# Altium footprint library MicroProcessor$.PcbLib: 8 footprints (part 1 of 2)
Each footprint in its own frame and in the unit in brackets; x right, y up, seen from the top. Pads: shape width x height; smd on the part's side, far side on the other; paste and mask are expansions set on the pad; w line width, h text height; cw(c..) or ccw(c..) is an arc to the next point about the centre after c.
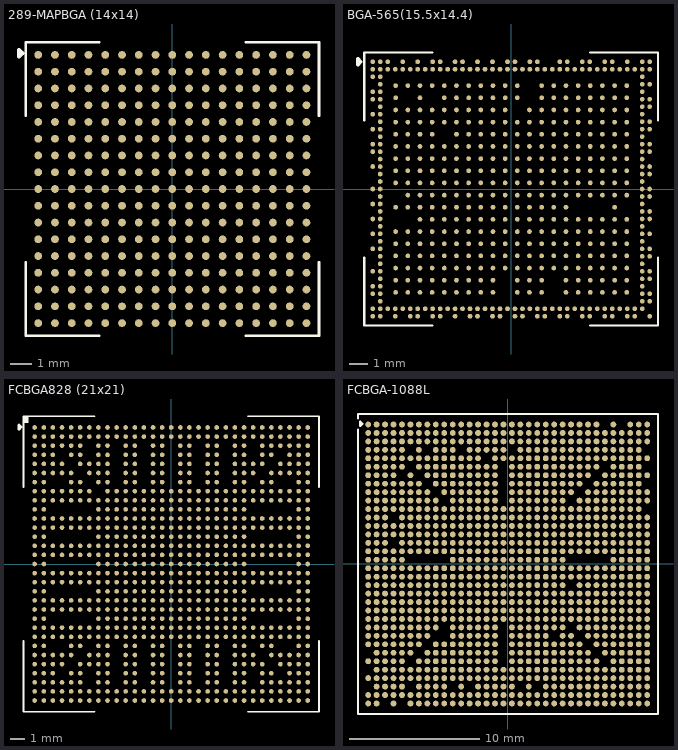
[diagram p0: the footprints below, top view; thin cyan lines are the x and y axes]

## 289-MAPBGA (14x14) [mm]
pads (289):
  round 0.37 smd: A1(-6.4,6.4) A2(-5.6,6.4) A3(-4.8,6.4) A4(-4,6.4) A5(-3.2,6.4) A6(-2.4,6.4) A7(-1.6,6.4) A8(-0.8,6.4) A9(0,6.4) A10(0.8,6.4) A11(1.6,6.4) A12(2.4,6.4) A13(3.2,6.4) A14(4,6.4) A15(4.8,6.4) A16(5.6,6.4) A17(6.4,6.4) B1(-6.4,5.6) B2(-5.6,5.6) B3(-4.8,5.6) B4(-4,5.6) B5(-3.2,5.6) B6(-2.4,5.6) B7(-1.6,5.6) B8(-0.8,5.6) B9(0,5.6) B10(0.8,5.6) B11(1.6,5.6) B12(2.4,5.6) B13(3.2,5.6) B14(4,5.6) B15(4.8,5.6) B16(5.6,5.6) B17(6.4,5.6) C1(-6.4,4.8) C2(-5.6,4.8) C3(-4.8,4.8) C4(-4,4.8) C5(-3.2,4.8) C6(-2.4,4.8) C7(-1.6,4.8) C8(-0.8,4.8) C9(0,4.8) C10(0.8,4.8) C11(1.6,4.8) C12(2.4,4.8) C13(3.2,4.8) C14(4,4.8) C15(4.8,4.8) C16(5.6,4.8) C17(6.4,4.8) D1(-6.4,4) D2(-5.6,4) D3(-4.8,4) D4(-4,4) D5(-3.2,4) D6(-2.4,4) D7(-1.6,4) D8(-0.8,4) D9(0,4) D10(0.8,4) D11(1.6,4) D12(2.4,4) D13(3.2,4) D14(4,4) D15(4.8,4) D16(5.6,4) D17(6.4,4) E1(-6.4,3.2) E2(-5.6,3.2) E3(-4.8,3.2) E4(-4,3.2) E5(-3.2,3.2) E6(-2.4,3.2) E7(-1.6,3.2) E8(-0.8,3.2) E9(0,3.2) E10(0.8,3.2) E11(1.6,3.2) E12(2.4,3.2) E13(3.2,3.2) E14(4,3.2) E15(4.8,3.2) E16(5.6,3.2) E17(6.4,3.2) F1(-6.4,2.4) F2(-5.6,2.4) F3(-4.8,2.4) F4(-4,2.4) F5(-3.2,2.4) F6(-2.4,2.4) F7(-1.6,2.4) F8(-0.8,2.4) F9(0,2.4) F10(0.8,2.4) F11(1.6,2.4) F12(2.4,2.4) F13(3.2,2.4) F14(4,2.4) F15(4.8,2.4) F16(5.6,2.4) F17(6.4,2.4) G1(-6.4,1.6) G2(-5.6,1.6) G3(-4.8,1.6) G4(-4,1.6) G5(-3.2,1.6) G6(-2.4,1.6) G7(-1.6,1.6) G8(-0.8,1.6) G9(0,1.6) G10(0.8,1.6) G11(1.6,1.6) G12(2.4,1.6) G13(3.2,1.6) G14(4,1.6) G15(4.8,1.6) G16(5.6,1.6) G17(6.4,1.6) H1(-6.4,0.8) H2(-5.6,0.8) H3(-4.8,0.8) H4(-4,0.8) H5(-3.2,0.8) H6(-2.4,0.8) H7(-1.6,0.8) H8(-0.8,0.8) H9(0,0.8) H10(0.8,0.8) H11(1.6,0.8) H12(2.4,0.8) H13(3.2,0.8) H14(4,0.8) H15(4.8,0.8) H16(5.6,0.8) H17(6.4,0.8) J1(-6.4,0) J2(-5.6,0) J3(-4.8,0) J4(-4,0) J5(-3.2,0) J6(-2.4,0) J7(-1.6,0) J8(-0.8,0) J9(0,0) J10(0.8,0) J11(1.6,0) J12(2.4,0) J13(3.2,0) J14(4,0) J15(4.8,0) J16(5.6,0) J17(6.4,0) K1(-6.4,-0.8) K2(-5.6,-0.8) K3(-4.8,-0.8) K4(-4,-0.8) K5(-3.2,-0.8) K6(-2.4,-0.8) K7(-1.6,-0.8) K8(-0.8,-0.8) K9(0,-0.8) K10(0.8,-0.8) K11(1.6,-0.8) K12(2.4,-0.8) K13(3.2,-0.8) K14(4,-0.8) K15(4.8,-0.8) K16(5.6,-0.8) K17(6.4,-0.8) L1(-6.4,-1.6) L2(-5.6,-1.6) L3(-4.8,-1.6) L4(-4,-1.6) L5(-3.2,-1.6) L6(-2.4,-1.6) L7(-1.6,-1.6) L8(-0.8,-1.6) L9(0,-1.6) L10(0.8,-1.6) L11(1.6,-1.6) L12(2.4,-1.6) L13(3.2,-1.6) L14(4,-1.6) L15(4.8,-1.6) L16(5.6,-1.6) L17(6.4,-1.6) M1(-6.4,-2.4) M2(-5.6,-2.4) M3(-4.8,-2.4) M4(-4,-2.4) M5(-3.2,-2.4) M6(-2.4,-2.4) M7(-1.6,-2.4) M8(-0.8,-2.4) M9(0,-2.4) M10(0.8,-2.4) M11(1.6,-2.4) M12(2.4,-2.4) M13(3.2,-2.4) M14(4,-2.4) M15(4.8,-2.4) M16(5.6,-2.4) M17(6.4,-2.4) N1(-6.4,-3.2) N2(-5.6,-3.2) N3(-4.8,-3.2) N4(-4,-3.2) N5(-3.2,-3.2) N6(-2.4,-3.2) N7(-1.6,-3.2) N8(-0.8,-3.2) N9(0,-3.2) N10(0.8,-3.2) N11(1.6,-3.2) N12(2.4,-3.2) N13(3.2,-3.2) N14(4,-3.2) N15(4.8,-3.2) N16(5.6,-3.2) N17(6.4,-3.2) P1(-6.4,-4) P2(-5.6,-4) P3(-4.8,-4) P4(-4,-4) P5(-3.2,-4) P6(-2.4,-4) P7(-1.6,-4) P8(-0.8,-4) P9(0,-4) P10(0.8,-4) P11(1.6,-4) P12(2.4,-4) P13(3.2,-4) P14(4,-4) P15(4.8,-4) P16(5.6,-4) P17(6.4,-4) R1(-6.4,-4.8) R2(-5.6,-4.8) R3(-4.8,-4.8) R4(-4,-4.8) R5(-3.2,-4.8) R6(-2.4,-4.8) R7(-1.6,-4.8) R8(-0.8,-4.8) R9(0,-4.8) R10(0.8,-4.8) R11(1.6,-4.8) R12(2.4,-4.8) R13(3.2,-4.8) R14(4,-4.8) R15(4.8,-4.8) R16(5.6,-4.8) R17(6.4,-4.8) T1(-6.4,-5.6) T2(-5.6,-5.6) T3(-4.8,-5.6) T4(-4,-5.6) T5(-3.2,-5.6) T6(-2.4,-5.6) T7(-1.6,-5.6) T8(-0.8,-5.6) T9(0,-5.6) T10(0.8,-5.6) T11(1.6,-5.6) T12(2.4,-5.6) T13(3.2,-5.6) T14(4,-5.6) T15(4.8,-5.6) T16(5.6,-5.6) T17(6.4,-5.6) U1(-6.4,-6.4) U2(-5.6,-6.4) U3(-4.8,-6.4) U4(-4,-6.4) U5(-3.2,-6.4) U6(-2.4,-6.4) U7(-1.6,-6.4) U8(-0.8,-6.4) U9(0,-6.4) U10(0.8,-6.4) U11(1.6,-6.4) U12(2.4,-6.4) U13(3.2,-6.4) U14(4,-6.4) U15(4.8,-6.4) U16(5.6,-6.4) U17(6.4,-6.4)
Top Overlay:
  lines w0.127: -7,-3.5 -7,-7 -3.5,-7 ; -7,3.5 -7,7 -3.5,7 ; 3.5,-7 7,-7 7,-3.5 ; 3.5,7 7,7 7,3.5
  lines w0.2: -7.315,6.325 -7.163,6.477 -7.315,6.629 -7.315,6.325
3D body "step_temp.STEP": height 1.32, standoff 0, extent -7,-7 7,7

## BGA-565(15.5x14.4) [mm]
pads (565):
  round 0.25 smd mask+0.05: 1A1(-6.175,5.525) 1A2(-5.525,5.525) 1A3(-4.875,5.525) 1A4(-4.225,5.525) 1A5(-3.575,5.525) 1A6(-2.925,5.525) 1A7(-2.275,5.525) 1A8(-1.625,5.525) 1A9(-0.975,5.525) 1A10(-0.325,5.525) 1A11(0.325,5.525) 1A13(1.625,5.525) 1A14(2.275,5.525) 1A15(2.925,5.525) 1A16(3.575,5.525) 1A17(4.225,5.525) 1A18(4.875,5.525) 1A19(5.525,5.525) 1A20(6.175,5.525) 1B1(-6.175,4.875) 1B3(-4.875,4.875) 1B5(-3.575,4.875) 1B6(-2.925,4.875) 1B7(-2.275,4.875) 1B8(-1.625,4.875) 1B9(-0.975,4.875) 1B10(-0.325,4.875) 1B11(0.325,4.875) 1B13(1.625,4.875) 1B14(2.275,4.875) 1B15(2.925,4.875) 1B16(3.575,4.875) 1B17(4.225,4.875) 1B18(4.875,4.875) 1B19(5.525,4.875) 1B20(6.175,4.875) 1C1(-6.175,4.225) 1C2(-5.525,4.225) 1C3(-4.875,4.225) 1C4(-4.225,4.225) 1C5(-3.575,4.225) 1C6(-2.925,4.225) 1C7(-2.275,4.225) 1C8(-1.625,4.225) 1C9(-0.975,4.225) 1C10(-0.325,4.225) 1C12(0.975,4.225) 1C13(1.625,4.225) 1C14(2.275,4.225) 1C15(2.925,4.225) 1C16(3.575,4.225) 1C17(4.225,4.225) 1C18(4.875,4.225) 1C19(5.525,4.225) 1C20(6.175,4.225) 1D1(-6.175,3.575) 1D2(-5.525,3.575) 1D3(-4.875,3.575) 1D4(-4.225,3.575) 1D5(-3.575,3.575) 1D6(-2.925,3.575) 1D7(-2.275,3.575) 1D8(-1.625,3.575) 1D9(-0.975,3.575) 1D10(-0.325,3.575) 1D11(0.325,3.575) 1D12(0.975,3.575) 1D13(1.625,3.575) 1D14(2.275,3.575) 1D15(2.925,3.575) 1D16(3.575,3.575) 1D17(4.225,3.575) 1D18(4.875,3.575) 1D19(5.525,3.575) 1D20(6.175,3.575) 1E1(-6.175,2.925) 1E2(-5.525,2.925) 1E3(-4.875,2.925) 1E4(-4.225,2.925) 1E6(-2.925,2.925) 1E7(-2.275,2.925) 1E8(-1.625,2.925) 1E9(-0.975,2.925) 1E10(-0.325,2.925) 1E11(0.325,2.925) 1E12(0.975,2.925) 1E13(1.625,2.925) 1E14(2.275,2.925) 1E15(2.925,2.925) 1E16(3.575,2.925) 1E17(4.225,2.925) 1E18(4.875,2.925) 1E19(5.525,2.925) 1E20(6.175,2.925) 1F1(-6.175,2.275) 1F2(-5.525,2.275) 1F3(-4.875,2.275) 1F4(-4.225,2.275) 1F5(-3.575,2.275) 1F6(-2.925,2.275) 1F7(-2.275,2.275) 1F8(-1.625,2.275) 1F9(-0.975,2.275) 1F10(-0.325,2.275) 1F11(0.325,2.275) 1F12(0.975,2.275) 1F13(1.625,2.275) 1F14(2.275,2.275) 1F15(2.925,2.275) 1F16(3.575,2.275) 1F17(4.225,2.275) 1F18(4.875,2.275) 1F19(5.525,2.275) 1F20(6.175,2.275) 1G1(-6.175,1.625) 1G2(-5.525,1.625) 1G3(-4.875,1.625) 1G4(-4.225,1.625) 1G5(-3.575,1.625) 1G6(-2.925,1.625) 1G7(-2.275,1.625) 1G8(-1.625,1.625) 1G9(-0.975,1.625) 1G10(-0.325,1.625) 1G11(0.325,1.625) 1G12(0.975,1.625) 1G13(1.625,1.625) 1G14(2.275,1.625) 1G15(2.925,1.625) 1G16(3.575,1.625) 1G17(4.225,1.625) 1G18(4.875,1.625) 1G19(5.525,1.625) 1G20(6.175,1.625) 1H1(-6.175,0.975) 1H2(-5.525,0.975) 1H3(-4.875,0.975) 1H4(-4.225,0.975) 1H5(-3.575,0.975) 1H6(-2.925,0.975) 1H7(-2.275,0.975) 1H8(-1.625,0.975) 1H9(-0.975,0.975) 1H10(-0.325,0.975) 1H11(0.325,0.975) 1H12(0.975,0.975) 1H13(1.625,0.975) 1H14(2.275,0.975) 1H15(2.925,0.975) 1H16(3.575,0.975) 1H17(4.225,0.975) 1H18(4.875,0.975) 1H19(5.525,0.975) 1H20(6.175,0.975) 1J1(-6.175,0.325) 1J2(-5.525,0.325) 1J3(-4.875,0.325) 1J4(-4.225,0.325) 1J5(-3.575,0.325) 1J6(-2.925,0.325) 1J7(-2.275,0.325) 1J8(-1.625,0.325) 1J9(-0.975,0.325) 1J10(-0.325,0.325) 1J11(0.325,0.325) 1J12(0.975,0.325) 1J13(1.625,0.325) 1J14(2.275,0.325) 1J15(2.925,0.325) 1J16(3.575,0.325) 1J17(4.225,0.325) 1J18(4.875,0.325) 1J19(5.525,0.325) 1J20(6.175,0.325) 1K2(-5.525,-0.325) 1K3(-4.875,-0.325) 1K4(-4.225,-0.325) 1K5(-3.575,-0.325) 1K6(-2.925,-0.325) 1K7(-2.275,-0.325) 1K8(-1.625,-0.325) 1K9(-0.975,-0.325) 1K10(-0.325,-0.325) 1K11(0.325,-0.325) 1K12(0.975,-0.325) 1K13(1.625,-0.325) 1K14(2.275,-0.325) 1K15(2.925,-0.325) 1K16(3.575,-0.325) 1K17(4.225,-0.325) 1K18(4.875,-0.325) 1K19(5.525,-0.325) 1K20(6.175,-0.325) 1L1(-6.175,-0.975) 1L2(-5.525,-0.975) 1L3(-4.875,-0.975) 1L4(-4.225,-0.975) 1L5(-3.575,-0.975) 1L6(-2.925,-0.975) 1L7(-2.275,-0.975) 1L8(-1.625,-0.975) 1L9(-0.975,-0.975) 1L10(-0.325,-0.975) 1L11(0.325,-0.975) 1L12(0.975,-0.975) 1L13(1.625,-0.975) 1L14(2.275,-0.975) 1L15(2.925,-0.975) 1L19(5.525,-0.975) 1M3(-4.875,-1.625) 1M4(-4.225,-1.625) 1M5(-3.575,-1.625) 1M6(-2.925,-1.625) 1M7(-2.275,-1.625) 1M8(-1.625,-1.625) 1M9(-0.975,-1.625) 1M10(-0.325,-1.625) 1M11(0.325,-1.625) 1M12(0.975,-1.625) 1M13(1.625,-1.625) 1M14(2.275,-1.625) 1M15(2.925,-1.625) 1M16(3.575,-1.625) 1M17(4.225,-1.625) 1M18(4.875,-1.625) 1M19(5.525,-1.625) 1M20(6.175,-1.625) 1N1(-6.175,-2.275) 1N2(-5.525,-2.275) 1N3(-4.875,-2.275) 1N4(-4.225,-2.275) 1N5(-3.575,-2.275) 1N6(-2.925,-2.275) 1N7(-2.275,-2.275) 1N8(-1.625,-2.275) 1N9(-0.975,-2.275) 1N10(-0.325,-2.275) 1N11(0.325,-2.275) 1N12(0.975,-2.275) 1N13(1.625,-2.275) 1N14(2.275,-2.275) 1N15(2.925,-2.275) 1N16(3.575,-2.275) 1N17(4.225,-2.275) 1N18(4.875,-2.275) 1N19(5.525,-2.275) 1N20(6.175,-2.275) 1P1(-6.175,-2.925) 1P2(-5.525,-2.925) 1P3(-4.875,-2.925) 1P4(-4.225,-2.925) 1P5(-3.575,-2.925) 1P6(-2.925,-2.925) 1P7(-2.275,-2.925) 1P8(-1.625,-2.925) 1P9(-0.975,-2.925) 1P10(-0.325,-2.925) 1P11(0.325,-2.925) 1P12(0.975,-2.925) 1P13(1.625,-2.925) 1P14(2.275,-2.925) 1P15(2.925,-2.925) 1P16(3.575,-2.925) 1P17(4.225,-2.925) 1P18(4.875,-2.925) 1P19(5.525,-2.925) 1P20(6.175,-2.925) 1R1(-6.175,-3.575) 1R2(-5.525,-3.575) 1R3(-4.875,-3.575) 1R4(-4.225,-3.575) 1R5(-3.575,-3.575) 1R6(-2.925,-3.575) 1R7(-2.275,-3.575) 1R8(-1.625,-3.575) 1R9(-0.975,-3.575) 1R10(-0.325,-3.575) 1R11(0.325,-3.575) 1R12(0.975,-3.575) 1R13(1.625,-3.575) 1R14(2.275,-3.575) 1R15(2.925,-3.575) 1R16(3.575,-3.575) 1R17(4.225,-3.575) 1R18(4.875,-3.575) 1R19(5.525,-3.575) 1R20(6.175,-3.575) 1T1(-6.175,-4.225) 1T2(-5.525,-4.225) 1T3(-4.875,-4.225) 1T4(-4.225,-4.225) 1T5(-3.575,-4.225) 1T6(-2.925,-4.225) 1T7(-2.275,-4.225) 1T8(-1.625,-4.225) 1T9(-0.975,-4.225) 1T10(-0.325,-4.225) 1T11(0.325,-4.225) 1T12(0.975,-4.225) 1T13(1.625,-4.225) 1T14(2.275,-4.225) 1T15(2.925,-4.225) 1T16(3.575,-4.225) 1T17(4.225,-4.225) 1T18(4.875,-4.225) 1T19(5.525,-4.225) 1T20(6.175,-4.225) 1U1(-6.175,-4.875) 1U2(-5.525,-4.875) 1U3(-4.875,-4.875) 1U4(-4.225,-4.875) 1U5(-3.575,-4.875) 1U6(-2.925,-4.875) 1U7(-2.275,-4.875) 1U8(-1.625,-4.875) 1U9(-0.975,-4.875) 1U11(0.325,-4.875) 1U12(0.975,-4.875) 1U13(1.625,-4.875) 1U15(2.925,-4.875) 1U16(3.575,-4.875) 1U17(4.225,-4.875) 1U18(4.875,-4.875) 1U19(5.525,-4.875) 1U20(6.175,-4.875) 1V1(-6.175,-5.525) 1V2(-5.525,-5.525) 1V3(-4.875,-5.525) 1V4(-4.225,-5.525) 1V5(-3.575,-5.525) 1V6(-2.925,-5.525) 1V7(-2.275,-5.525) 1V8(-1.625,-5.525) 1V9(-0.975,-5.525) 1V11(0.325,-5.525) 1V12(0.975,-5.525) 1V13(1.625,-5.525) 1V15(2.925,-5.525) 1V16(3.575,-5.525) 1V17(4.225,-5.525) 1V18(4.875,-5.525) 1V19(5.525,-5.525) 1V20(6.175,-5.525) A1(-7.4,6.8) A2(-7,6.8) A3(-6.6,6.8) A5(-5.8,6.8) A7(-5,6.8) A9(-4.2,6.8) A10(-3.8,6.8) A12(-3,6.8) A13(-2.6,6.8) A15(-1.8,6.8) A17(-1,6.8) A19(-0.2,6.8) A20(0.2,6.8) A22(1,6.8) A23(1.4,6.8) A26(2.6,6.8) A27(3,6.8) A29(3.8,6.8) A30(4.2,6.8) A32(5,6.8) A33(5.4,6.8) A35(6.2,6.8) A37(7,6.8) A38(7.4,6.8) AA2(-7,-1.2) AA37(7,-1.2) AA38(7.4,-1.2) AB1(-7.4,-1.6) AB2(-7,-1.6) AB37(7,-1.6) AB38(7.4,-1.6) AC2(-7,-2) AC37(7,-2) AD1(-7.4,-2.4) AD2(-7,-2.4) AD37(7,-2.4) AD38(7.4,-2.4) AE2(-7,-2.8) AE37(7,-2.8) AF1(-7.4,-3.2) AF2(-7,-3.2) AF37(7,-3.2) AF38(7.4,-3.2) AG2(-7,-3.6) AG37(7,-3.6) AG38(7.4,-3.6) AH2(-7,-4) AH37(7,-4) AJ1(-7.4,-4.4) AJ2(-7,-4.4) AJ37(7,-4.4) AJ38(7.4,-4.4) AK2(-7,-4.8) AK37(7,-4.8) AK38(7.4,-4.8) AL1(-7.4,-5.2) AL2(-7,-5.2) AL37(7,-5.2) AM1(-7.4,-5.6) AM2(-7,-5.6) AM37(7,-5.6) AM38(7.4,-5.6) AN2(-7,-6) AN37(7,-6) AN38(7.4,-6) AP1(-7.4,-6.4) AP2(-7,-6.4) AP3(-6.6,-6.4) AP4(-6.2,-6.4) AP5(-5.8,-6.4) AP6(-5.4,-6.4) AP7(-5,-6.4) AP8(-4.6,-6.4) AP9(-4.2,-6.4) AP10(-3.8,-6.4) AP11(-3.4,-6.4) AP12(-3,-6.4) AP13(-2.6,-6.4) AP14(-2.2,-6.4) AP15(-1.8,-6.4) AP16(-1.4,-6.4) AP17(-1,-6.4) AP18(-0.6,-6.4) AP19(-0.2,-6.4) AP20(0.2,-6.4) AP21(0.6,-6.4) AP22(1,-6.4) AP23(1.4,-6.4) AP24(1.8,-6.4) AP25(2.2,-6.4) AP26(2.6,-6.4) AP27(3,-6.4) AP28(3.4,-6.4) AP29(3.8,-6.4) AP30(4.2,-6.4) AP31(4.6,-6.4) AP32(5,-6.4) AP33(5.4,-6.4) AP34(5.8,-6.4) AP35(6.2,-6.4) AP36(6.6,-6.4) AP37(7,-6.4) AR1(-7.4,-6.8) AR2(-7,-6.8) AR4(-6.2,-6.8) AR6(-5.4,-6.8) AR7(-5,-6.8) AR9(-4.2,-6.8) AR10(-3.8,-6.8) AR12(-3,-6.8) AR14(-2.2,-6.8) AR15(-1.8,-6.8) AR17(-1,-6.8) AR18(-0.6,-6.8) AR20(0.2,-6.8) AR21(0.6,-6.8) AR23(1.4,-6.8) AR24(1.8,-6.8) AR26(2.6,-6.8) AR27(3,-6.8) AR29(3.8,-6.8) AR30(4.2,-6.8) AR32(5,-6.8) AR33(5.4,-6.8) AR35(6.2,-6.8) AR36(6.6,-6.8) AR38(7.4,-6.8) B1(-7.4,6.4) B2(-7,6.4) B3(-6.6,6.4) B4(-6.2,6.4) B5(-5.8,6.4) B6(-5.4,6.4) B7(-5,6.4) B8(-4.6,6.4) B9(-4.2,6.4) B10(-3.8,6.4) B11(-3.4,6.4) B12(-3,6.4) B13(-2.6,6.4) B14(-2.2,6.4) B15(-1.8,6.4) B16(-1.4,6.4) B17(-1,6.4) B18(-0.6,6.4) B19(-0.2,6.4) B20(0.2,6.4) B21(0.6,6.4) B22(1,6.4) B23(1.4,6.4) B24(1.8,6.4) B25(2.2,6.4) B26(2.6,6.4) B27(3,6.4) B28(3.4,6.4) B29(3.8,6.4) B30(4.2,6.4) B31(4.6,6.4) B32(5,6.4) B33(5.4,6.4) B34(5.8,6.4) B35(6.2,6.4) B36(6.6,6.4) B37(7,6.4) B38(7.4,6.4) C1(-7.4,6) C2(-7,6) C37(7,6) D2(-7,5.6) D37(7,5.6) D38(7.4,5.6) E1(-7.4,5.2) E2(-7,5.2) E37(7,5.2) F1(-7.4,4.8) F2(-7,4.8) F37(7,4.8) F38(7.4,4.8) G2(-7,4.4) G37(7,4.4) G38(7.4,4.4) H1(-7.4,4) H2(-7,4) H37(7,4) J2(-7,3.6) J37(7,3.6) J38(7.4,3.6) K1(-7.4,3.2) K2(-7,3.2) K37(7,3.2) K38(7.4,3.2) L2(-7,2.8) L37(7,2.8) M1(-7.4,2.4) M2(-7,2.4) M37(7,2.4) M38(7.4,2.4) N1(-7.4,2) N2(-7,2) N37(7,2) N38(7.4,2) P2(-7,1.6) P37(7,1.6) R1(-7.4,1.2) R2(-7,1.2) R37(7,1.2) R38(7.4,1.2) T2(-7,0.8) T37(7,0.8) T38(7.4,0.8) U2(-7,0.4) U37(7,0.4) V1(-7.4,0) V2(-7,0) V37(7,0) V38(7.4,0) W2(-7,-0.4) W37(7,-0.4) W38(7.4,-0.4) Y1(-7.4,-0.8) Y2(-7,-0.8) Y37(7,-0.8)
Top Overlay:
  lines w0.127: -7.845,-3.671 -7.845,-7.296 -4.22,-7.296 ; -7.845,3.671 -7.845,7.296 -4.22,7.296 ; 4.22,-7.296 7.845,-7.296 7.845,-3.671 ; 4.22,7.296 7.845,7.296 7.845,3.671
  lines w0.2: -8.187,6.648 -8.035,6.8 -8.187,6.952 -8.187,6.648
3D body "RK3566--3DModel-STEP-56544.STEP": height 0.9, standoff 0, extent -7.75,-7.2 7.75,7.2

## FCBGA828 (21x21) [mm]
pads (828):
  round 0.33 smd: A1(-9.75,9.75) A2(-9.1,9.75) A3(-8.45,9.75) A4(-7.8,9.75) A5(-7.15,9.75) A6(-6.5,9.75) A7(-5.85,9.75) A8(-5.2,9.75) A9(-4.55,9.75) A10(-3.9,9.75) A11(-3.25,9.75) A12(-2.6,9.75) A13(-1.95,9.75) A14(-1.3,9.75) A15(-0.65,9.75) A16(0,9.75) A17(0.65,9.75) A18(1.3,9.75) A19(1.95,9.75) A20(2.6,9.75) A21(3.25,9.75) A22(3.9,9.75) A23(4.55,9.75) A24(5.2,9.75) A25(5.85,9.75) A26(6.5,9.75) A27(7.15,9.75) A28(7.8,9.75) A29(8.45,9.75) A30(9.1,9.75) A31(9.75,9.75) AA1(-9.75,-3.25) AA2(-9.1,-3.25) AA3(-8.45,-3.25) AA4(-7.8,-3.25) AA5(-7.15,-3.25) AA6(-6.5,-3.25) AA7(-5.85,-3.25) AA8(-5.2,-3.25) AA9(-4.55,-3.25) AA10(-3.9,-3.25) AA11(-3.25,-3.25) AA12(-2.6,-3.25) AA13(-1.95,-3.25) AA14(-1.3,-3.25) AA15(-0.65,-3.25) AA16(0,-3.25) AA17(0.65,-3.25) AA18(1.3,-3.25) AA19(1.95,-3.25) AA20(2.6,-3.25) AA21(3.25,-3.25) AA22(3.9,-3.25) AA23(4.55,-3.25) AA24(5.2,-3.25) AA25(5.85,-3.25) AA26(6.5,-3.25) AA27(7.15,-3.25) AA28(7.8,-3.25) AA29(8.45,-3.25) AA30(9.1,-3.25) AA31(9.75,-3.25) AB1(-9.75,-3.9) AB2(-9.1,-3.9) AB8(-5.2,-3.9) AB9(-4.55,-3.9) AB10(-3.9,-3.9) AB11(-3.25,-3.9) AB12(-2.6,-3.9) AB13(-1.95,-3.9) AB14(-1.3,-3.9) AB15(-0.65,-3.9) AB16(0,-3.9) AB17(0.65,-3.9) AB18(1.3,-3.9) AB19(1.95,-3.9) AB20(2.6,-3.9) AB21(3.25,-3.9) AB22(3.9,-3.9) AB23(4.55,-3.9) AB24(5.2,-3.9) AB30(9.1,-3.9) AB31(9.75,-3.9) AC1(-9.75,-4.55) AC2(-9.1,-4.55) AC3(-8.45,-4.55) AC4(-7.8,-4.55) AC5(-7.15,-4.55) AC6(-6.5,-4.55) AC7(-5.85,-4.55) AC8(-5.2,-4.55) AC9(-4.55,-4.55) AC10(-3.9,-4.55) AC11(-3.25,-4.55) AC12(-2.6,-4.55) AC13(-1.95,-4.55) AC14(-1.3,-4.55) AC15(-0.65,-4.55) AC16(0,-4.55) AC17(0.65,-4.55) AC18(1.3,-4.55) AC19(1.95,-4.55) AC20(2.6,-4.55) AC21(3.25,-4.55) AC22(3.9,-4.55) AC23(4.55,-4.55) AC24(5.2,-4.55) AC25(5.85,-4.55) AC26(6.5,-4.55) AC27(7.15,-4.55) AC28(7.8,-4.55) AC29(8.45,-4.55) AC30(9.1,-4.55) AC31(9.75,-4.55) AD1(-9.75,-5.2) AD2(-9.1,-5.2) AD3(-8.45,-5.2) AD4(-7.8,-5.2) AD5(-7.15,-5.2) AD6(-6.5,-5.2) AD7(-5.85,-5.2) AD8(-5.2,-5.2) AD9(-4.55,-5.2) AD10(-3.9,-5.2) AD11(-3.25,-5.2) AD12(-2.6,-5.2) AD13(-1.95,-5.2) AD14(-1.3,-5.2) AD15(-0.65,-5.2) AD16(0,-5.2) AD17(0.65,-5.2) AD18(1.3,-5.2) AD19(1.95,-5.2) AD20(2.6,-5.2) AD21(3.25,-5.2) AD22(3.9,-5.2) AD23(4.55,-5.2) AD24(5.2,-5.2) AD25(5.85,-5.2) AD26(6.5,-5.2) AD27(7.15,-5.2) AD28(7.8,-5.2) AD29(8.45,-5.2) AD30(9.1,-5.2) AD31(9.75,-5.2) AE1(-9.75,-5.85) AE2(-9.1,-5.85) AE5(-7.15,-5.85) AE6(-6.5,-5.85) AE8(-5.2,-5.85) AE9(-4.55,-5.85) AE11(-3.25,-5.85) AE12(-2.6,-5.85) AE14(-1.3,-5.85) AE15(-0.65,-5.85) AE17(0.65,-5.85) AE18(1.3,-5.85) AE20(2.6,-5.85) AE21(3.25,-5.85) AE23(4.55,-5.85) AE24(5.2,-5.85) AE26(6.5,-5.85) AE27(7.15,-5.85) AE30(9.1,-5.85) AE31(9.75,-5.85) AF1(-9.75,-6.5) AF2(-9.1,-6.5) AF3(-8.45,-6.5) AF4(-7.8,-6.5) AF5(-7.15,-6.5) AF7(-5.85,-6.5) AF8(-5.2,-6.5) AF9(-4.55,-6.5) AF11(-3.25,-6.5) AF12(-2.6,-6.5) AF14(-1.3,-6.5) AF15(-0.65,-6.5) AF17(0.65,-6.5) AF18(1.3,-6.5) AF20(2.6,-6.5) AF21(3.25,-6.5) AF23(4.55,-6.5) AF24(5.2,-6.5) AF25(5.85,-6.5) AF27(7.15,-6.5) AF28(7.8,-6.5) AF29(8.45,-6.5) AF30(9.1,-6.5) AF31(9.75,-6.5) AG1(-9.75,-7.15) AG2(-9.1,-7.15) AG3(-8.45,-7.15) AG4(-7.8,-7.15) AG6(-6.5,-7.15) AG7(-5.85,-7.15) AG8(-5.2,-7.15) AG9(-4.55,-7.15) AG11(-3.25,-7.15) AG12(-2.6,-7.15) AG14(-1.3,-7.15) AG15(-0.65,-7.15) AG17(0.65,-7.15) AG18(1.3,-7.15) AG20(2.6,-7.15) AG21(3.25,-7.15) AG23(4.55,-7.15) AG24(5.2,-7.15) AG25(5.85,-7.15) AG26(6.5,-7.15) AG28(7.8,-7.15) AG29(8.45,-7.15) AG30(9.1,-7.15) AG31(9.75,-7.15) AH1(-9.75,-7.8) AH2(-9.1,-7.8) AH3(-8.45,-7.8) AH5(-7.15,-7.8) AH6(-6.5,-7.8) AH8(-5.2,-7.8) AH9(-4.55,-7.8) AH11(-3.25,-7.8) AH12(-2.6,-7.8) AH14(-1.3,-7.8) AH15(-0.65,-7.8) AH17(0.65,-7.8) AH18(1.3,-7.8) AH20(2.6,-7.8) AH21(3.25,-7.8) AH23(4.55,-7.8) AH24(5.2,-7.8) AH26(6.5,-7.8) AH27(7.15,-7.8) AH29(8.45,-7.8) AH30(9.1,-7.8) AH31(9.75,-7.8) AJ1(-9.75,-8.45) AJ2(-9.1,-8.45) AJ3(-8.45,-8.45) AJ4(-7.8,-8.45) AJ5(-7.15,-8.45) AJ6(-6.5,-8.45) AJ8(-5.2,-8.45) AJ9(-4.55,-8.45) AJ11(-3.25,-8.45) AJ12(-2.6,-8.45) AJ14(-1.3,-8.45) AJ15(-0.65,-8.45) AJ17(0.65,-8.45) AJ18(1.3,-8.45) AJ20(2.6,-8.45) AJ21(3.25,-8.45) AJ23(4.55,-8.45) AJ24(5.2,-8.45) AJ26(6.5,-8.45) AJ27(7.15,-8.45) AJ28(7.8,-8.45) AJ29(8.45,-8.45) AJ30(9.1,-8.45) AJ31(9.75,-8.45) AK1(-9.75,-9.1) AK2(-9.1,-9.1) AK3(-8.45,-9.1) AK4(-7.8,-9.1) AK5(-7.15,-9.1) AK6(-6.5,-9.1) AK7(-5.85,-9.1) AK8(-5.2,-9.1) AK9(-4.55,-9.1) AK10(-3.9,-9.1) AK11(-3.25,-9.1) AK12(-2.6,-9.1) AK13(-1.95,-9.1) AK14(-1.3,-9.1) AK15(-0.65,-9.1) AK16(0,-9.1) AK17(0.65,-9.1) AK18(1.3,-9.1) AK19(1.95,-9.1) AK20(2.6,-9.1) AK21(3.25,-9.1) AK22(3.9,-9.1) AK23(4.55,-9.1) AK24(5.2,-9.1) AK25(5.85,-9.1) AK26(6.5,-9.1) AK27(7.15,-9.1) AK28(7.8,-9.1) AK29(8.45,-9.1) AK30(9.1,-9.1) AK31(9.75,-9.1) AL1(-9.75,-9.75) AL2(-9.1,-9.75) AL3(-8.45,-9.75) AL4(-7.8,-9.75) AL5(-7.15,-9.75) AL6(-6.5,-9.75) AL7(-5.85,-9.75) AL8(-5.2,-9.75) AL9(-4.55,-9.75) AL10(-3.9,-9.75) AL11(-3.25,-9.75) AL12(-2.6,-9.75) AL13(-1.95,-9.75) AL14(-1.3,-9.75) AL15(-0.65,-9.75) AL16(0,-9.75) AL17(0.65,-9.75) AL18(1.3,-9.75) AL19(1.95,-9.75) AL20(2.6,-9.75) AL21(3.25,-9.75) AL22(3.9,-9.75) AL23(4.55,-9.75) AL24(5.2,-9.75) AL25(5.85,-9.75) AL26(6.5,-9.75) AL27(7.15,-9.75) AL28(7.8,-9.75) AL29(8.45,-9.75) AL30(9.1,-9.75) AL31(9.75,-9.75) B1(-9.75,9.1) B2(-9.1,9.1) B3(-8.45,9.1) B4(-7.8,9.1) B5(-7.15,9.1) B6(-6.5,9.1) B7(-5.85,9.1) B8(-5.2,9.1) B9(-4.55,9.1) B10(-3.9,9.1) B11(-3.25,9.1) B12(-2.6,9.1) B13(-1.95,9.1) B14(-1.3,9.1) B15(-0.65,9.1) B16(0,9.1) B17(0.65,9.1) B18(1.3,9.1) B19(1.95,9.1) B20(2.6,9.1) B21(3.25,9.1) B22(3.9,9.1) B23(4.55,9.1) B24(5.2,9.1) B25(5.85,9.1) B26(6.5,9.1) B27(7.15,9.1) B28(7.8,9.1) B29(8.45,9.1) B30(9.1,9.1) B31(9.75,9.1) C1(-9.75,8.45) C2(-9.1,8.45) C3(-8.45,8.45) C4(-7.8,8.45) C5(-7.15,8.45) C6(-6.5,8.45) C8(-5.2,8.45) C9(-4.55,8.45) C11(-3.25,8.45) C12(-2.6,8.45) C14(-1.3,8.45) C15(-0.65,8.45) C17(0.65,8.45) C18(1.3,8.45) C20(2.6,8.45) C21(3.25,8.45) C23(4.55,8.45) C24(5.2,8.45) C26(6.5,8.45) C27(7.15,8.45) C28(7.8,8.45) C29(8.45,8.45) C30(9.1,8.45) C31(9.75,8.45) D1(-9.75,7.8) D2(-9.1,7.8) D3(-8.45,7.8) D5(-7.15,7.8) D6(-6.5,7.8) D8(-5.2,7.8) D9(-4.55,7.8) D11(-3.25,7.8) D12(-2.6,7.8) D14(-1.3,7.8) D15(-0.65,7.8) D17(0.65,7.8) D18(1.3,7.8) D20(2.6,7.8) D21(3.25,7.8) D23(4.55,7.8) D24(5.2,7.8) D26(6.5,7.8) D27(7.15,7.8) D29(8.45,7.8) D30(9.1,7.8) D31(9.75,7.8) E1(-9.75,7.15) E2(-9.1,7.15) E3(-8.45,7.15) E4(-7.8,7.15) E6(-6.5,7.15) E7(-5.85,7.15) E8(-5.2,7.15) E9(-4.55,7.15) E11(-3.25,7.15) E12(-2.6,7.15) E14(-1.3,7.15) E15(-0.65,7.15) E17(0.65,7.15) E18(1.3,7.15) E20(2.6,7.15) E21(3.25,7.15) E23(4.55,7.15) E24(5.2,7.15) E25(5.85,7.15) E26(6.5,7.15) E28(7.8,7.15) E29(8.45,7.15) E30(9.1,7.15) E31(9.75,7.15) F1(-9.75,6.5) F2(-9.1,6.5) F3(-8.45,6.5) F4(-7.8,6.5) F5(-7.15,6.5) F7(-5.85,6.5) F8(-5.2,6.5) F9(-4.55,6.5) F11(-3.25,6.5) F12(-2.6,6.5) F14(-1.3,6.5) F15(-0.65,6.5) F17(0.65,6.5) F18(1.3,6.5) F20(2.6,6.5) F21(3.25,6.5) F23(4.55,6.5) F24(5.2,6.5) F25(5.85,6.5) F27(7.15,6.5) F28(7.8,6.5) F29(8.45,6.5) F30(9.1,6.5) F31(9.75,6.5) G1(-9.75,5.85) G2(-9.1,5.85) G5(-7.15,5.85) G6(-6.5,5.85) G8(-5.2,5.85) G9(-4.55,5.85) G11(-3.25,5.85) G12(-2.6,5.85) G14(-1.3,5.85) G15(-0.65,5.85) G17(0.65,5.85) G18(1.3,5.85) G20(2.6,5.85) G21(3.25,5.85) G23(4.55,5.85) G24(5.2,5.85) G26(6.5,5.85) G27(7.15,5.85) G30(9.1,5.85) G31(9.75,5.85) H1(-9.75,5.2) H2(-9.1,5.2) H3(-8.45,5.2) H4(-7.8,5.2) H5(-7.15,5.2) H6(-6.5,5.2) H7(-5.85,5.2) H9(-4.55,5.2) H10(-3.9,5.2) H11(-3.25,5.2) H12(-2.6,5.2) H13(-1.95,5.2) H14(-1.3,5.2) H15(-0.65,5.2) H16(0,5.2) H17(0.65,5.2) H18(1.3,5.2) H19(1.95,5.2) H20(2.6,5.2) H21(3.25,5.2) H22(3.9,5.2) H23(4.55,5.2) H24(5.2,5.2) H25(5.85,5.2) H26(6.5,5.2) H27(7.15,5.2) H28(7.8,5.2) H29(8.45,5.2) H30(9.1,5.2) H31(9.75,5.2) J1(-9.75,4.55) J2(-9.1,4.55) J3(-8.45,4.55) J4(-7.8,4.55) J5(-7.15,4.55) J6(-6.5,4.55) J7(-5.85,4.55) J8(-5.2,4.55) J9(-4.55,4.55) J10(-3.9,4.55) J11(-3.25,4.55) J12(-2.6,4.55) J13(-1.95,4.55) J14(-1.3,4.55) J15(-0.65,4.55) J16(0,4.55) J17(0.65,4.55) J18(1.3,4.55) J19(1.95,4.55) J20(2.6,4.55) J21(3.25,4.55) J22(3.9,4.55) J23(4.55,4.55) J24(5.2,4.55) J25(5.85,4.55) J26(6.5,4.55) J27(7.15,4.55) J28(7.8,4.55) J29(8.45,4.55) J30(9.1,4.55) J31(9.75,4.55) K1(-9.75,3.9) K2(-9.1,3.9) K8(-5.2,3.9) K9(-4.55,3.9) K10(-3.9,3.9) K11(-3.25,3.9) K12(-2.6,3.9) K13(-1.95,3.9) K14(-1.3,3.9) K15(-0.65,3.9) K16(0,3.9) K17(0.65,3.9) K18(1.3,3.9) K19(1.95,3.9) K20(2.6,3.9) K21(3.25,3.9) K22(3.9,3.9) K23(4.55,3.9) K24(5.2,3.9) K30(9.1,3.9) K31(9.75,3.9) L1(-9.75,3.25) L2(-9.1,3.25) L3(-8.45,3.25) L4(-7.8,3.25) L5(-7.15,3.25) L6(-6.5,3.25) L7(-5.85,3.25) L8(-5.2,3.25) L9(-4.55,3.25) L10(-3.9,3.25) L11(-3.25,3.25) L12(-2.6,3.25) L13(-1.95,3.25) L14(-1.3,3.25) L15(-0.65,3.25) L16(0,3.25) L17(0.65,3.25) L18(1.3,3.25) L19(1.95,3.25) L20(2.6,3.25) L21(3.25,3.25) L22(3.9,3.25) L23(4.55,3.25) L24(5.2,3.25) L25(5.85,3.25) L26(6.5,3.25) L27(7.15,3.25) L28(7.8,3.25) L29(8.45,3.25) L30(9.1,3.25) L31(9.75,3.25) M1(-9.75,2.6) M2(-9.1,2.6) M3(-8.45,2.6) M4(-7.8,2.6) M5(-7.15,2.6) M6(-6.5,2.6) M7(-5.85,2.6) M8(-5.2,2.6) M9(-4.55,2.6) M10(-3.9,2.6) M11(-3.25,2.6) M12(-2.6,2.6) M13(-1.95,2.6) M14(-1.3,2.6) M15(-0.65,2.6) M16(0,2.6) M17(0.65,2.6) M18(1.3,2.6) M19(1.95,2.6) M20(2.6,2.6) M21(3.25,2.6) M22(3.9,2.6) M23(4.55,2.6) M24(5.2,2.6) M25(5.85,2.6) M26(6.5,2.6) M27(7.15,2.6) M28(7.8,2.6) M29(8.45,2.6) M30(9.1,2.6) M31(9.75,2.6) N1(-9.75,1.95) N2(-9.1,1.95) N8(-5.2,1.95) N9(-4.55,1.95) N10(-3.9,1.95) N11(-3.25,1.95) N12(-2.6,1.95) N13(-1.95,1.95) N14(-1.3,1.95) N15(-0.65,1.95) N16(0,1.95) N17(0.65,1.95) N18(1.3,1.95) N19(1.95,1.95) N20(2.6,1.95) N21(3.25,1.95) N22(3.9,1.95) N23(4.55,1.95) N24(5.2,1.95) N30(9.1,1.95) N31(9.75,1.95) P1(-9.75,1.3) P2(-9.1,1.3) P3(-8.45,1.3) P4(-7.8,1.3) P5(-7.15,1.3) P6(-6.5,1.3) P7(-5.85,1.3) P8(-5.2,1.3) P9(-4.55,1.3) P10(-3.9,1.3) P11(-3.25,1.3) P12(-2.6,1.3) P13(-1.95,1.3) P14(-1.3,1.3) P15(-0.65,1.3) P16(0,1.3) P17(0.65,1.3) P18(1.3,1.3) P19(1.95,1.3) P20(2.6,1.3) P21(3.25,1.3) P22(3.9,1.3) P23(4.55,1.3) P24(5.2,1.3) P25(5.85,1.3) P26(6.5,1.3) P27(7.15,1.3) P28(7.8,1.3) P29(8.45,1.3) P30(9.1,1.3) P31(9.75,1.3) R1(-9.75,0.65) R2(-9.1,0.65) R3(-8.45,0.65) R4(-7.8,0.65) R5(-7.15,0.65) R6(-6.5,0.65) R7(-5.85,0.65) R8(-5.2,0.65) R9(-4.55,0.65) R10(-3.9,0.65) R11(-3.25,0.65) R12(-2.6,0.65) R13(-1.95,0.65) R14(-1.3,0.65) R15(-0.65,0.65) R16(0,0.65) R17(0.65,0.65) R18(1.3,0.65) R19(1.95,0.65) R20(2.6,0.65) R21(3.25,0.65) R22(3.9,0.65) R23(4.55,0.65) R24(5.2,0.65) R25(5.85,0.65) R26(6.5,0.65) R27(7.15,0.65) R28(7.8,0.65) R29(8.45,0.65) R30(9.1,0.65) R31(9.75,0.65) T1(-9.75,0) T2(-9.1,0) T8(-5.2,0) T9(-4.55,0) T10(-3.9,0) T11(-3.25,0) T12(-2.6,0) T13(-1.95,0) T14(-1.3,0) T15(-0.65,0) T16(0,0) T17(0.65,0) T18(1.3,0) T19(1.95,0) T20(2.6,0) T21(3.25,0) T22(3.9,0) T23(4.55,0) T24(5.2,0) T30(9.1,0) T31(9.75,0) U1(-9.75,-0.65) U2(-9.1,-0.65) U3(-8.45,-0.65) U4(-7.8,-0.65) U5(-7.15,-0.65) U6(-6.5,-0.65) U7(-5.85,-0.65) U8(-5.2,-0.65) U9(-4.55,-0.65) U10(-3.9,-0.65) U11(-3.25,-0.65) U12(-2.6,-0.65) U13(-1.95,-0.65) U14(-1.3,-0.65) U15(-0.65,-0.65) U16(0,-0.65) U17(0.65,-0.65) U18(1.3,-0.65) U19(1.95,-0.65) U20(2.6,-0.65) U21(3.25,-0.65) U22(3.9,-0.65) U23(4.55,-0.65) U24(5.2,-0.65) U25(5.85,-0.65) U26(6.5,-0.65) U27(7.15,-0.65) U28(7.8,-0.65) U29(8.45,-0.65) U30(9.1,-0.65) U31(9.75,-0.65) V1(-9.75,-1.3) V2(-9.1,-1.3) V3(-8.45,-1.3) V4(-7.8,-1.3) V5(-7.15,-1.3) V6(-6.5,-1.3) V7(-5.85,-1.3) V8(-5.2,-1.3) V9(-4.55,-1.3) V10(-3.9,-1.3) V11(-3.25,-1.3) V12(-2.6,-1.3) V13(-1.95,-1.3) V14(-1.3,-1.3) V15(-0.65,-1.3) V16(0,-1.3) V17(0.65,-1.3) V18(1.3,-1.3) V19(1.95,-1.3) V20(2.6,-1.3) V21(3.25,-1.3) V22(3.9,-1.3) V23(4.55,-1.3) V24(5.2,-1.3) V25(5.85,-1.3) V26(6.5,-1.3) V27(7.15,-1.3) V28(7.8,-1.3) V29(8.45,-1.3) V30(9.1,-1.3) V31(9.75,-1.3) W1(-9.75,-1.95) W2(-9.1,-1.95) W8(-5.2,-1.95) W9(-4.55,-1.95) W10(-3.9,-1.95) W11(-3.25,-1.95) W12(-2.6,-1.95) W13(-1.95,-1.95) W14(-1.3,-1.95) W15(-0.65,-1.95) W16(0,-1.95) W17(0.65,-1.95) W18(1.3,-1.95) W19(1.95,-1.95) W20(2.6,-1.95) W21(3.25,-1.95) W22(3.9,-1.95) W23(4.55,-1.95) W24(5.2,-1.95) W30(9.1,-1.95) W31(9.75,-1.95) Y1(-9.75,-2.6) Y2(-9.1,-2.6) Y3(-8.45,-2.6) Y4(-7.8,-2.6) Y5(-7.15,-2.6) Y6(-6.5,-2.6) Y7(-5.85,-2.6) Y8(-5.2,-2.6) Y9(-4.55,-2.6) Y10(-3.9,-2.6) Y11(-3.25,-2.6) Y12(-2.6,-2.6) Y13(-1.95,-2.6) Y14(-1.3,-2.6) Y15(-0.65,-2.6) Y16(0,-2.6) Y17(0.65,-2.6) Y18(1.3,-2.6) Y19(1.95,-2.6) Y20(2.6,-2.6) Y21(3.25,-2.6) Y22(3.9,-2.6) Y23(4.55,-2.6) Y24(5.2,-2.6) Y25(5.85,-2.6) Y26(6.5,-2.6) Y27(7.15,-2.6) Y28(7.8,-2.6) Y29(8.45,-2.6) Y30(9.1,-2.6) Y31(9.75,-2.6)
Top Overlay:
  rectangle: -10.555,10.084 -10.185,10.555
  lines w0.127: -10.555,-5.475 -10.555,-10.555 -5.475,-10.555 ; -10.555,5.475 -10.555,10.555 -5.475,10.555 ; 5.475,-10.555 10.555,-10.555 10.555,-5.475 ; 5.475,10.555 10.555,10.555 10.555,5.475
  lines w0.2: -10.871,9.627 -10.871,9.931 -10.719,9.779 -10.871,9.627
3D body "RK3399--3DModel-STEP-56544.STEP": height 1.57, standoff -0.04, extent -10.5,-10.5 10.5,10.5

## FCBGA-1088L [mm]
pads (1089):
  round 0.45 smd: A1(-10.725,10.725) A2(-10.075,10.725) A3(-9.425,10.725) A4(-8.775,10.725) A5(-8.125,10.725) A6(-7.475,10.725) A7(-6.825,10.725) A8(-6.175,10.725) A9(-5.525,10.725) A10(-4.875,10.725) A11(-4.225,10.725) A12(-3.575,10.725) A13(-2.925,10.725) A14(-2.275,10.725) A15(-1.625,10.725) A16(-0.975,10.725) A17(-0.325,10.725) A18(0.325,10.725) A19(0.975,10.725) A20(1.625,10.725) A21(2.275,10.725) A22(2.925,10.725) A23(3.575,10.725) A24(4.225,10.725) A25(4.875,10.725) A26(5.525,10.725) A27(6.175,10.725) A28(6.825,10.725) A30(8.125,10.725) A32(9.425,10.725) A33(10.075,10.725) A34(10.725,10.725) AA1(-10.725,-2.275) AA2(-10.075,-2.275) AA3(-9.425,-2.275) AA4(-8.775,-2.275) AA5(-8.125,-2.275) AA6(-7.475,-2.275) AA7(-6.825,-2.275) AA8(-6.175,-2.275) AA9(-5.525,-2.275) AA10(-4.875,-2.275) AA11(-4.225,-2.275) AA12(-3.575,-2.275) AA13(-2.925,-2.275) AA14(-2.275,-2.275) AA15(-1.625,-2.275) AA16(-0.975,-2.275) AA17(-0.325,-2.275) AA18(0.325,-2.275) AA19(0.975,-2.275) AA20(1.625,-2.275) AA21(2.275,-2.275) AA22(2.925,-2.275) AA23(3.575,-2.275) AA24(4.225,-2.275) AA25(4.875,-2.275) AA26(5.525,-2.275) AA27(6.175,-2.275) AA28(6.825,-2.275) AA29(7.475,-2.275) AA30(8.125,-2.275) AA31(8.775,-2.275) AA32(9.425,-2.275) AA33(10.075,-2.275) AA34(10.725,-2.275) AB1(-10.725,-2.925) AB2(-10.075,-2.925) AB3(-9.425,-2.925) AB4(-8.775,-2.925) AB5(-8.125,-2.925) AB6(-7.475,-2.925) AB7(-6.825,-2.925) AB8(-6.175,-2.925) AB9(-5.525,-2.925) AB10(-4.875,-2.925) AB11(-4.225,-2.925) AB12(-3.575,-2.925) AB13(-2.925,-2.925) AB14(-2.275,-2.925) AB15(-1.625,-2.925) AB16(-0.975,-2.925) AB17(-0.325,-2.925) AB18(0.325,-2.925) AB19(0.975,-2.925) AB20(1.625,-2.925) AB21(2.275,-2.925) AB22(2.925,-2.925) AB23(3.575,-2.925) AB24(4.225,-2.925) AB25(4.875,-2.925) AB26(5.525,-2.925) AB27(6.175,-2.925) AB28(6.825,-2.925) AB29(7.475,-2.925) AB30(8.125,-2.925) AB31(8.775,-2.925) AB32(9.425,-2.925) AB33(10.075,-2.925) AB34(10.725,-2.925) AC1(-10.725,-3.575) AC2(-10.075,-3.575) AC3(-9.425,-3.575) AC4(-8.775,-3.575) AC5(-8.125,-3.575) AC6(-7.475,-3.575) AC7(-6.825,-3.575) AC8(-6.175,-3.575) AC9(-5.525,-3.575) AC10(-4.875,-3.575) AC11(-4.225,-3.575) AC12(-3.575,-3.575) AC13(-2.925,-3.575) AC14(-2.275,-3.575) AC15(-1.625,-3.575) AC16(-0.975,-3.575) AC17(-0.325,-3.575) AC18(0.325,-3.575) AC19(0.975,-3.575) AC20(1.625,-3.575) AC21(2.275,-3.575) AC22(2.925,-3.575) AC23(3.575,-3.575) AC24(4.225,-3.575) AC25(4.875,-3.575) AC26(5.525,-3.575) AC27(6.175,-3.575) AC28(6.825,-3.575) AC29(7.475,-3.575) AC30(8.125,-3.575) AC31(8.775,-3.575) AC32(9.425,-3.575) AC33(10.075,-3.575) AC34(10.725,-3.575) AD1(-10.725,-4.225) AD2(-10.075,-4.225) AD3(-9.425,-4.225) AD4(-8.775,-4.225) AD5(-8.125,-4.225) AD6(-7.475,-4.225) AD7(-6.825,-4.225) AD8(-6.175,-4.225) AD9(-5.525,-4.225) AD10(-4.875,-4.225) AD11(-4.225,-4.225) AD12(-3.575,-4.225) AD13(-2.925,-4.225) AD14(-2.275,-4.225) AD15(-1.625,-4.225) AD16(-0.975,-4.225) AD17(-0.325,-4.225) AD18(0.325,-4.225) AD19(0.975,-4.225) AD20(1.625,-4.225) AD21(2.275,-4.225) AD22(2.925,-4.225) AD23(3.575,-4.225) AD24(4.225,-4.225) AD25(4.875,-4.225) AD26(5.525,-4.225) AD27(6.175,-4.225) AD28(6.825,-4.225) AD29(7.475,-4.225) AD30(8.125,-4.225) AD31(8.775,-4.225) AD32(9.425,-4.225) AD33(10.075,-4.225) AD34(10.725,-4.225) AE1(-10.725,-4.875) AE2(-10.075,-4.875) AE3(-9.425,-4.875) AE4(-8.775,-4.875) AE5(-8.125,-4.875) AE6(-7.475,-4.875) AE7(-6.825,-4.875) AE8(-6.175,-4.875) AE9(-5.525,-4.875) AE11(-4.225,-4.875) AE12(-3.575,-4.875) AE13(-2.925,-4.875) AE14(-2.275,-4.875) AE15(-1.625,-4.875) AE16(-0.975,-4.875) AE18(0.325,-4.875) AE19(0.975,-4.875) AE20(1.625,-4.875) AE21(2.275,-4.875) AE22(2.925,-4.875) AE23(3.575,-4.875) AE24(4.225,-4.875) AE26(5.525,-4.875) AE27(6.175,-4.875) AE28(6.825,-4.875) AE29(7.475,-4.875) AE30(8.125,-4.875) AE31(8.775,-4.875) AE32(9.425,-4.875) AE33(10.075,-4.875) AE34(10.725,-4.875) AF1(-10.725,-5.525) AF2(-10.075,-5.525) AF3(-9.425,-5.525) AF4(-8.775,-5.525) AF5(-8.125,-5.525) AF6(-7.475,-5.525) AF7(-6.825,-5.525) AF8(-6.175,-5.525) AF11(-4.225,-5.525) AF12(-3.575,-5.525) AF13(-2.925,-5.525) AF14(-2.275,-5.525) AF15(-1.625,-5.525) AF16(-0.975,-5.525) AF18(0.325,-5.525) AF19(0.975,-5.525) AF20(1.625,-5.525) AF21(2.275,-5.525) AF22(2.925,-5.525) AF24(4.225,-5.525) AF25(4.875,-5.525) AF27(6.175,-5.525) AF28(6.825,-5.525) AF29(7.475,-5.525) AF30(8.125,-5.525) AF31(8.775,-5.525) AF32(9.425,-5.525) AF33(10.075,-5.525) AF34(10.725,-5.525) AG1(-10.725,-6.175) AG2(-10.075,-6.175) AG3(-9.425,-6.175) AG4(-8.775,-6.175) AG5(-8.125,-6.175) AG6(-7.475,-6.175) AG7(-6.825,-6.175) AG9(-5.525,-6.175) AG10(-4.875,-6.175) AG11(-4.225,-6.175) AG12(-3.575,-6.175) AG13(-2.925,-6.175) AG14(-2.275,-6.175) AG15(-1.625,-6.175) AG16(-0.975,-6.175) AG18(0.325,-6.175) AG19(0.975,-6.175) AG20(1.625,-6.175) AG21(2.275,-6.175) AG22(2.925,-6.175) AG23(3.575,-6.175) AG24(4.225,-6.175) AG25(4.875,-6.175) AG26(5.525,-6.175) AG28(6.825,-6.175) AG29(7.475,-6.175) AG30(8.125,-6.175) AG31(8.775,-6.175) AG32(9.425,-6.175) AG33(10.075,-6.175) AG34(10.725,-6.175) AH2(-10.075,-6.825) AH3(-9.425,-6.825) AH4(-8.775,-6.825) AH5(-8.125,-6.825) AH6(-7.475,-6.825) AH8(-6.175,-6.825) AH9(-5.525,-6.825) AH10(-4.875,-6.825) AH11(-4.225,-6.825) AH12(-3.575,-6.825) AH13(-2.925,-6.825) AH14(-2.275,-6.825) AH15(-1.625,-6.825) AH16(-0.975,-6.825) AH18(0.325,-6.825) AH19(0.975,-6.825) AH20(1.625,-6.825) AH21(2.275,-6.825) AH22(2.925,-6.825) AH23(3.575,-6.825) AH24(4.225,-6.825) AH25(4.875,-6.825) AH26(5.525,-6.825) AH27(6.175,-6.825) AH29(7.475,-6.825) AH30(8.125,-6.825) AH31(8.775,-6.825) AH32(9.425,-6.825) AH33(10.075,-6.825) AH34(10.725,-6.825) AJ1(-10.725,-7.475) AJ2(-10.075,-7.475) AJ3(-9.425,-7.475) AJ4(-8.775,-7.475) AJ5(-8.125,-7.475) AJ7(-6.825,-7.475) AJ8(-6.175,-7.475) AJ9(-5.525,-7.475) AJ10(-4.875,-7.475) AJ11(-4.225,-7.475) AJ12(-3.575,-7.475) AJ13(-2.925,-7.475) AJ14(-2.275,-7.475) AJ15(-1.625,-7.475) AJ16(-0.975,-7.475) AJ18(0.325,-7.475) AJ19(0.975,-7.475) AJ20(1.625,-7.475) AJ21(2.275,-7.475) AJ22(2.925,-7.475) AJ23(3.575,-7.475) AJ24(4.225,-7.475) AJ25(4.875,-7.475) AJ26(5.525,-7.475) AJ27(6.175,-7.475) AJ28(6.825,-7.475) AJ30(8.125,-7.475) AJ31(8.775,-7.475) AJ32(9.425,-7.475) AJ33(10.075,-7.475) AJ34(10.725,-7.475) AK2(-10.075,-8.125) AK3(-9.425,-8.125) AK4(-8.775,-8.125) AK5(-8.125,-8.125) AK6(-7.475,-8.125) AK7(-6.825,-8.125) AK8(-6.175,-8.125) AK9(-5.525,-8.125) AK10(-4.875,-8.125) AK11(-4.225,-8.125) AK12(-3.575,-8.125) AK13(-2.925,-8.125) AK14(-2.275,-8.125) AK15(-1.625,-8.125) AK16(-0.975,-8.125) AK17(-0.325,-8.125) AK18(0.325,-8.125) AK19(0.975,-8.125) AK20(1.625,-8.125) AK21(2.275,-8.125) AK22(2.925,-8.125) AK23(3.575,-8.125) AK24(4.225,-8.125) AK25(4.875,-8.125) AK26(5.525,-8.125) AK27(6.175,-8.125) AK28(6.825,-8.125) AK29(7.475,-8.125) AK30(8.125,-8.125) AK31(8.775,-8.125) AK32(9.425,-8.125) AK33(10.075,-8.125) AK34(10.725,-8.125) AL1(-10.725,-8.775) AL2(-10.075,-8.775) AL3(-9.425,-8.775) AL4(-8.775,-8.775) AL5(-8.125,-8.775) AL6(-7.475,-8.775) AL7(-6.825,-8.775) AL8(-6.175,-8.775) AL9(-5.525,-8.775) AL10(-4.875,-8.775) AL11(-4.225,-8.775) AL12(-3.575,-8.775) AL13(-2.925,-8.775) AL14(-2.275,-8.775) AL15(-1.625,-8.775) AL16(-0.975,-8.775) AL17(-0.325,-8.775) AL18(0.325,-8.775) AL19(0.975,-8.775) AL20(1.625,-8.775) AL21(2.275,-8.775) AL22(2.925,-8.775) AL23(3.575,-8.775) AL24(4.225,-8.775) AL25(4.875,-8.775) AL26(5.525,-8.775) AL27(6.175,-8.775) AL28(6.825,-8.775) AL29(7.475,-8.775) AL30(8.125,-8.775) AL31(8.775,-8.775) AL32(9.425,-8.775) AL33(10.075,-8.775) AL34(10.725,-8.775) AM2(-10.075,-9.425) AM3(-9.425,-9.425) AM4(-8.775,-9.425) AM5(-8.125,-9.425) AM7(-6.825,-9.425) AM8(-6.175,-9.425) AM9(-5.525,-9.425) AM10(-4.875,-9.425) AM12(-3.575,-9.425) AM14(-2.275,-9.425) AM15(-1.625,-9.425) AM16(-0.975,-9.425) AM17(-0.325,-9.425) AM18(0.325,-9.425) AM20(1.625,-9.425) AM22(2.925,-9.425) AM23(3.575,-9.425) AM24(4.225,-9.425) AM25(4.875,-9.425) AM26(5.525,-9.425) AM27(6.175,-9.425) AM28(6.825,-9.425) AM29(7.475,-9.425) AM30(8.125,-9.425) AM31(8.775,-9.425) AM32(9.425,-9.425) AM33(10.075,-9.425) AM34(10.725,-9.425) AN1(-10.725,-10.075) AN2(-10.075,-10.075) AN3(-9.425,-10.075) AN4(-8.775,-10.075) AN5(-8.125,-10.075) AN6(-7.475,-10.075) AN7(-6.825,-10.075) AN8(-6.175,-10.075) AN9(-5.525,-10.075) AN10(-4.875,-10.075) AN11(-4.225,-10.075) AN12(-3.575,-10.075) AN13(-2.925,-10.075) AN14(-2.275,-10.075) AN15(-1.625,-10.075) AN16(-0.975,-10.075) AN17(-0.325,-10.075) AN18(0.325,-10.075) AN19(0.975,-10.075) AN20(1.625,-10.075) AN21(2.275,-10.075) AN22(2.925,-10.075) AN23(3.575,-10.075) AN24(4.225,-10.075) AN25(4.875,-10.075) AN26(5.525,-10.075) AN27(6.175,-10.075) AN28(6.825,-10.075) AN29(7.475,-10.075) AN30(8.125,-10.075) AN31(8.775,-10.075) AN32(9.425,-10.075) AN33(10.075,-10.075) AN34(10.725,-10.075) AP1(-10.725,-10.725) AP2(-10.075,-10.725) AP4(-8.775,-10.725) AP6(-7.475,-10.725) AP7(-6.825,-10.725) AP8(-6.175,-10.725) AP9(-5.525,-10.725) AP10(-4.875,-10.725) AP11(-4.225,-10.725) AP12(-3.575,-10.725) AP13(-2.925,-10.725) AP14(-2.275,-10.725) AP15(-1.625,-10.725) AP16(-0.975,-10.725) AP17(-0.325,-10.725) AP18(0.325,-10.725) AP19(0.975,-10.725) AP20(1.625,-10.725) AP21(2.275,-10.725) AP22(2.925,-10.725) AP23(3.575,-10.725) AP24(4.225,-10.725) AP25(4.875,-10.725) AP26(5.525,-10.725) AP27(6.175,-10.725) AP28(6.825,-10.725) AP29(7.475,-10.725) AP30(8.125,-10.725) AP31(8.775,-10.725) AP32(9.425,-10.725) AP33(10.075,-10.725) AP34(10.725,-10.725) B1(-10.725,10.075) B2(-10.075,10.075) B3(-9.425,10.075) B4(-8.775,10.075) B5(-8.125,10.075) B6(-7.475,10.075) B7(-6.825,10.075) B8(-6.175,10.075) B9(-5.525,10.075) B10(-4.875,10.075) B11(-4.225,10.075) B12(-3.575,10.075) B13(-2.925,10.075) B14(-2.275,10.075) B15(-1.625,10.075) B16(-0.975,10.075) B17(-0.325,10.075) B18(0.325,10.075) B19(0.975,10.075) B20(1.625,10.075) B21(2.275,10.075) B22(2.925,10.075) B23(3.575,10.075) B24(4.225,10.075) B25(4.875,10.075) B26(5.525,10.075) B27(6.175,10.075) B28(6.825,10.075) B29(7.475,10.075) B30(8.125,10.075) B31(8.775,10.075) B32(9.425,10.075) B33(10.075,10.075) B34(10.725,10.075) C1(-10.725,9.425) C2(-10.075,9.425) C3(-9.425,9.425) C4(-8.775,9.425) C5(-8.125,9.425) C6(-7.475,9.425) C7(-6.825,9.425) C8(-6.175,9.425) C9(-5.525,9.425) C10(-4.875,9.425) C11(-4.225,9.425) C12(-3.575,9.425) C13(-2.925,9.425) C14(-2.275,9.425) C15(-1.625,9.425) C16(-0.975,9.425) C17(-0.325,9.425) C18(0.325,9.425) C19(0.975,9.425) C20(1.625,9.425) C21(2.275,9.425) C22(2.925,9.425) C23(3.575,9.425) C24(4.225,9.425) C25(4.875,9.425) C26(5.525,9.425) C27(6.175,9.425) C28(6.825,9.425) C29(7.475,9.425) C30(8.125,9.425) C31(8.775,9.425) C32(9.425,9.425) C33(10.075,9.425) C34(10.725,9.425) D1(-10.725,8.775) D2(-10.075,8.775) D3(-9.425,8.775) D4(-8.775,8.775) D5(-8.125,8.775) D7(-6.825,8.775) D9(-5.525,8.775) D10(-4.875,8.775) D11(-4.225,8.775) D13(-2.925,8.775) D14(-2.275,8.775) D15(-1.625,8.775) D16(-0.975,8.775) D17(-0.325,8.775) D19(0.975,8.775) D20(1.625,8.775) D21(2.275,8.775) D22(2.925,8.775) D23(3.575,8.775) D24(4.225,8.775) D25(4.875,8.775) D26(5.525,8.775) D27(6.175,8.775) D28(6.825,8.775) D29(7.475,8.775) D30(8.125,8.775) D31(8.775,8.775) D32(9.425,8.775) D33(10.075,8.775) E1(-10.725,8.125) E2(-10.075,8.125) E3(-9.425,8.125) E4(-8.775,8.125) E5(-8.125,8.125) E6(-7.475,8.125) E7(-6.825,8.125) E8(-6.175,8.125) E9(-5.525,8.125) E10(-4.875,8.125) E11(-4.225,8.125) E12(-3.575,8.125) E13(-2.925,8.125) E14(-2.275,8.125) E16(-0.975,8.125) E17(-0.325,8.125) E18(0.325,8.125) E19(0.975,8.125) E20(1.625,8.125) E21(2.275,8.125) E22(2.925,8.125) E23(3.575,8.125) E24(4.225,8.125) E25(4.875,8.125) E26(5.525,8.125) E27(6.175,8.125) E28(6.825,8.125) E29(7.475,8.125) E30(8.125,8.125) E31(8.775,8.125) E32(9.425,8.125) E33(10.075,8.125) E34(10.725,8.125) F1(-10.725,7.475) F2(-10.075,7.475) F3(-9.425,7.475) F4(-8.775,7.475) F5(-8.125,7.475) F7(-6.825,7.475) F8(-6.175,7.475) F9(-5.525,7.475) F10(-4.875,7.475) F11(-4.225,7.475) F12(-3.575,7.475) F13(-2.925,7.475) F14(-2.275,7.475) F15(-1.625,7.475) F16(-0.975,7.475) F18(0.325,7.475) F19(0.975,7.475) F20(1.625,7.475) F21(2.275,7.475) F22(2.925,7.475) F23(3.575,7.475) F24(4.225,7.475) F25(4.875,7.475) F26(5.525,7.475) F27(6.175,7.475) F28(6.825,7.475) F30(8.125,7.475) F31(8.775,7.475) F32(9.425,7.475) F33(10.075,7.475) G1(-10.725,6.825) G2(-10.075,6.825) G3(-9.425,6.825) G4(-8.775,6.825) G6(-7.475,6.825) G8(-6.175,6.825) G9(-5.525,6.825) G10(-4.875,6.825) G11(-4.225,6.825) G12(-3.575,6.825) G13(-2.925,6.825) G14(-2.275,6.825) G15(-1.625,6.825) G16(-0.975,6.825) G18(0.325,6.825) G19(0.975,6.825) G20(1.625,6.825) G21(2.275,6.825) G22(2.925,6.825) G23(3.575,6.825) G24(4.225,6.825) G25(4.875,6.825) G26(5.525,6.825) G27(6.175,6.825) G29(7.475,6.825) G30(8.125,6.825) G31(8.775,6.825) G32(9.425,6.825) G33(10.075,6.825) G34(10.725,6.825) H1(-10.725,6.175) H2(-10.075,6.175) H3(-9.425,6.175) H4(-8.775,6.175) H5(-8.125,6.175) H6(-7.475,6.175) H7(-6.825,6.175) H9(-5.525,6.175) H10(-4.875,6.175) H11(-4.225,6.175) H12(-3.575,6.175) H13(-2.925,6.175) H14(-2.275,6.175) H15(-1.625,6.175) H16(-0.975,6.175) H18(0.325,6.175) H19(0.975,6.175) H20(1.625,6.175) H21(2.275,6.175) H22(2.925,6.175) H23(3.575,6.175) H24(4.225,6.175) H25(4.875,6.175) H26(5.525,6.175) H28(6.825,6.175) H29(7.475,6.175) H30(8.125,6.175) H31(8.775,6.175) H32(9.425,6.175) H33(10.075,6.175) J1(-10.725,5.525) J2(-10.075,5.525) J3(-9.425,5.525) J4(-8.775,5.525) J5(-8.125,5.525) J6(-7.475,5.525) J7(-6.825,5.525) J8(-6.175,5.525) J10(-4.875,5.525) J11(-4.225,5.525) J12(-3.575,5.525) J13(-2.925,5.525) J14(-2.275,5.525) J15(-1.625,5.525) J16(-0.975,5.525) J18(0.325,5.525) J19(0.975,5.525) J20(1.625,5.525) J21(2.275,5.525) J22(2.925,5.525) J23(3.575,5.525) J24(4.225,5.525) J25(4.875,5.525) J27(6.175,5.525) J28(6.825,5.525) J29(7.475,5.525) J30(8.125,5.525) J31(8.775,5.525) J32(9.425,5.525) J33(10.075,5.525) J34(10.725,5.525) K1(-10.725,4.875) K2(-10.075,4.875) K3(-9.425,4.875) K4(-8.775,4.875) K5(-8.125,4.875) K6(-7.475,4.875) K7(-6.825,4.875) K8(-6.175,4.875) K9(-5.525,4.875) K11(-4.225,4.875) K12(-3.575,4.875) K13(-2.925,4.875) K14(-2.275,4.875) K15(-1.625,4.875) K16(-0.975,4.875) K18(0.325,4.875) K19(0.975,4.875) K20(1.625,4.875) K21(2.275,4.875) K22(2.925,4.875) K23(3.575,4.875) K24(4.225,4.875) K26(5.525,4.875) K27(6.175,4.875) K28(6.825,4.875) K29(7.475,4.875) K30(8.125,4.875) K31(8.775,4.875) K32(9.425,4.875) K33(10.075,4.875) K34(10.725,4.875) L1(-10.725,4.225) L2(-10.075,4.225) L3(-9.425,4.225) L4(-8.775,4.225) L5(-8.125,4.225) L6(-7.475,4.225) L7(-6.825,4.225) L8(-6.175,4.225) L9(-5.525,4.225) L10(-4.875,4.225) L11(-4.225,4.225) L12(-3.575,4.225) L13(-2.925,4.225) L14(-2.275,4.225) L15(-1.625,4.225) L16(-0.975,4.225) L17(-0.325,4.225) L18(0.325,4.225) L19(0.975,4.225) L20(1.625,4.225) L21(2.275,4.225) L22(2.925,4.225) L23(3.575,4.225) L24(4.225,4.225) L25(4.875,4.225) L26(5.525,4.225) L27(6.175,4.225) L28(6.825,4.225) L29(7.475,4.225) L30(8.125,4.225) L31(8.775,4.225) L32(9.425,4.225) L33(10.075,4.225) M1(-10.725,3.575) M2(-10.075,3.575) M3(-9.425,3.575) M5(-8.125,3.575) M6(-7.475,3.575) M7(-6.825,3.575) M8(-6.175,3.575) M9(-5.525,3.575) M10(-4.875,3.575) M11(-4.225,3.575) M12(-3.575,3.575) M13(-2.925,3.575) M14(-2.275,3.575) M15(-1.625,3.575) M16(-0.975,3.575) M17(-0.325,3.575) M18(0.325,3.575) M19(0.975,3.575) M20(1.625,3.575) M21(2.275,3.575) M22(2.925,3.575) M23(3.575,3.575) M24(4.225,3.575) M25(4.875,3.575) M26(5.525,3.575) M27(6.175,3.575) M28(6.825,3.575) M29(7.475,3.575) M30(8.125,3.575) M31(8.775,3.575) M32(9.425,3.575) M33(10.075,3.575) M34(10.725,3.575) N1(-10.725,2.925) N2(-10.075,2.925) N3(-9.425,2.925) N4(-8.775,2.925) N5(-8.125,2.925) N6(-7.475,2.925) N7(-6.825,2.925) N8(-6.175,2.925) N9(-5.525,2.925) N10(-4.875,2.925) N11(-4.225,2.925) N12(-3.575,2.925) N13(-2.925,2.925) N14(-2.275,2.925) N15(-1.625,2.925) N16(-0.975,2.925) N17(-0.325,2.925) N18(0.325,2.925) N19(0.975,2.925) N20(1.625,2.925) N21(2.275,2.925) N22(2.925,2.925) N23(3.575,2.925) N24(4.225,2.925) N25(4.875,2.925) N26(5.525,2.925) N27(6.175,2.925) N28(6.825,2.925) N29(7.475,2.925) N30(8.125,2.925) N31(8.775,2.925) N32(9.425,2.925) N33(10.075,2.925) N34(10.725,2.925) P1(-10.725,2.275) P2(-10.075,2.275) P3(-9.425,2.275) P4(-8.775,2.275) P5(-8.125,2.275) P6(-7.475,2.275) P7(-6.825,2.275) P8(-6.175,2.275) P9(-5.525,2.275) P10(-4.875,2.275) P11(-4.225,2.275) P12(-3.575,2.275) P13(-2.925,2.275) P14(-2.275,2.275) P15(-1.625,2.275) P16(-0.975,2.275) P17(-0.325,2.275) P18(0.325,2.275) P19(0.975,2.275) P20(1.625,2.275) P21(2.275,2.275) P22(2.925,2.275) P23(3.575,2.275) P24(4.225,2.275) P25(4.875,2.275) P26(5.525,2.275) P27(6.175,2.275) P28(6.825,2.275) P29(7.475,2.275) P30(8.125,2.275) P31(8.775,2.275) P32(9.425,2.275) P33(10.075,2.275) P34(10.725,2.275) R1(-10.725,1.625) R2(-10.075,1.625) R3(-9.425,1.625) R5(-8.125,1.625) R6(-7.475,1.625) R7(-6.825,1.625) R8(-6.175,1.625) R9(-5.525,1.625) R10(-4.875,1.625) R11(-4.225,1.625) R12(-3.575,1.625) R13(-2.925,1.625) R14(-2.275,1.625) R15(-1.625,1.625) R16(-0.975,1.625) R17(-0.325,1.625) R18(0.325,1.625) R19(0.975,1.625) R20(1.625,1.625) R21(2.275,1.625) R22(2.925,1.625) R23(3.575,1.625) R24(4.225,1.625) R25(4.875,1.625) R26(5.525,1.625) R27(6.175,1.625) R28(6.825,1.625) R29(7.475,1.625) R30(8.125,1.625) R31(8.775,1.625) R32(9.425,1.625) R33(10.075,1.625) R34(10.725,1.625) T1(-10.725,0.975) T2(-10.075,0.975) T3(-9.425,0.975) T4(-8.775,0.975) T5(-8.125,0.975) T6(-7.475,0.975) T7(-6.825,0.975) T8(-6.175,0.975) T9(-5.525,0.975) T10(-4.875,0.975) T11(-4.225,0.975) T12(-3.575,0.975) T13(-2.925,0.975) T14(-2.275,0.975) T15(-1.625,0.975) T16(-0.975,0.975) T17(-0.325,0.975) T18(0.325,0.975) T19(0.975,0.975) T20(1.625,0.975) T21(2.275,0.975) T22(2.925,0.975) T23(3.575,0.975) T24(4.225,0.975) T25(4.875,0.975) T26(5.525,0.975) T27(6.175,0.975) T28(6.825,0.975) T29(7.475,0.975) T30(8.125,0.975) T31(8.775,0.975) T32(9.425,0.975) T33(10.075,0.975) T34(10.725,0.975) U1(-10.725,0.325) U2(-10.075,0.325) U3(-9.425,0.325) U4(-8.775,0.325) U5(-8.125,0.325) U11(-4.225,0.325) U12(-3.575,0.325) U13(-2.925,0.325) U14(-2.275,0.325) U15(-1.625,0.325) U16(-0.975,0.325) U17(-0.325,0.325) U18(0.325,0.325) U19(0.975,0.325) U20(1.625,0.325) U21(2.275,0.325) U22(2.925,0.325) U23(3.575,0.325) U24(4.225,0.325) U30(8.125,0.325) U31(8.775,0.325) U32(9.425,0.325) U33(10.075,0.325) U34(10.725,0.325) V1(-10.725,-0.325) V2(-10.075,-0.325) V3(-9.425,-0.325) V4(-8.775,-0.325) V5(-8.125,-0.325) V6(-7.475,-0.325) V7(-6.825,-0.325) V8(-6.175,-0.325) V9(-5.525,-0.325) V10(-4.875,-0.325) V11(-4.225,-0.325) V12(-3.575,-0.325) V13(-2.925,-0.325) V14(-2.275,-0.325) V15(-1.625,-0.325) V16(-0.975,-0.325) V17(-0.325,-0.325) V18(0.325,-0.325) V19(0.975,-0.325) V20(1.625,-0.325) V21(2.275,-0.325) V22(2.925,-0.325) V23(3.575,-0.325) V24(4.225,-0.325) V25(4.875,-0.325) V26(5.525,-0.325) V27(6.175,-0.325) V28(6.825,-0.325) V29(7.475,-0.325) V30(8.125,-0.325) V31(8.775,-0.325) V32(9.425,-0.325) V33(10.075,-0.325) V34(10.725,-0.325) W1(-10.725,-0.975) W2(-10.075,-0.975) W3(-9.425,-0.975) W4(-8.775,-0.975) W5(-8.125,-0.975) W6(-7.475,-0.975) W7(-6.825,-0.975) W8(-6.175,-0.975) W9(-5.525,-0.975) W10(-4.875,-0.975) W11(-4.225,-0.975) W12(-3.575,-0.975) W13(-2.925,-0.975) W14(-2.275,-0.975) W15(-1.625,-0.975) W16(-0.975,-0.975) W17(-0.325,-0.975) W18(0.325,-0.975) W19(0.975,-0.975) W20(1.625,-0.975) W21(2.275,-0.975) W22(2.925,-0.975) W23(3.575,-0.975) W24(4.225,-0.975) W25(4.875,-0.975) W26(5.525,-0.975) W27(6.175,-0.975) W28(6.825,-0.975) W29(7.475,-0.975) W30(8.125,-0.975) W31(8.775,-0.975) W32(9.425,-0.975) W33(10.075,-0.975) W34(10.725,-0.975) Y1(-10.725,-1.625) Y2(-10.075,-1.625) Y3(-9.425,-1.625) Y4(-8.775,-1.625) Y5(-8.125,-1.625) Y6(-7.475,-1.625) Y7(-6.825,-1.625) Y8(-6.175,-1.625) Y9(-5.525,-1.625) Y10(-4.875,-1.625) Y11(-4.225,-1.625) Y12(-3.575,-1.625) Y13(-2.925,-1.625) Y14(-2.275,-1.625) Y15(-1.625,-1.625) Y16(-0.975,-1.625) Y17(-0.325,-1.625) Y18(0.325,-1.625) Y19(0.975,-1.625) Y20(1.625,-1.625) Y21(2.275,-1.625) Y22(2.925,-1.625) Y23(3.575,-1.625) Y24(4.225,-1.625) Y26(5.525,-1.625) Y27(6.175,-1.625) Y28(6.825,-1.625) Y29(7.475,-1.625) Y30(8.125,-1.625) Y31(8.775,-1.625) Y32(9.425,-1.625) Y33(10.075,-1.625) Y34(10.725,-1.625)
Top Overlay:
  lines w0.127: -11.506,10.363 -11.506,-11.532 11.557,-11.532 11.557,11.532 -11.506,11.532 -11.506,11.176
  lines w0.2: -11.335,10.623 -11.182,10.776 -11.335,10.928 -11.335,10.623
3D body "Rockchip.STEP": height 1.18, standoff -0.03, extent -11.481,-11.5 11.519,11.5